# Altium schematic symbol library PogopenSchem.SchLib: 2 symbols
Pins are listed as number, name and electrical type; pins without a type are passive.

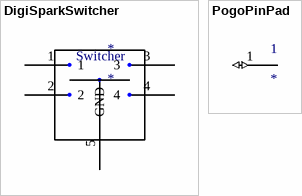
[diagram p0: symbols DigiSparkSwitcher to PogoPinPad]

## DigiSparkSwitcher
designator *
footprint DigiSparkSwitcher
pins: 1, 2, 3, 4, 5 GND
text: Switcher

## PogoPinPad
designator 1
Simple pad for the pogo pin to make contact with
footprint Pogopin_pad_female_2mm
pins: 1 PogoPad (io)